# Altium footprint library SOP.PcbLib: 19 footprints (part 1 of 2)
Each footprint in its own frame and in the unit in brackets; x right, y up, seen from the top. Pads: shape width x height; smd on the part's side, far side on the other; paste and mask are expansions set on the pad; w line width, h text height; cw(c..) or ccw(c..) is an arc to the next point about the centre after c.
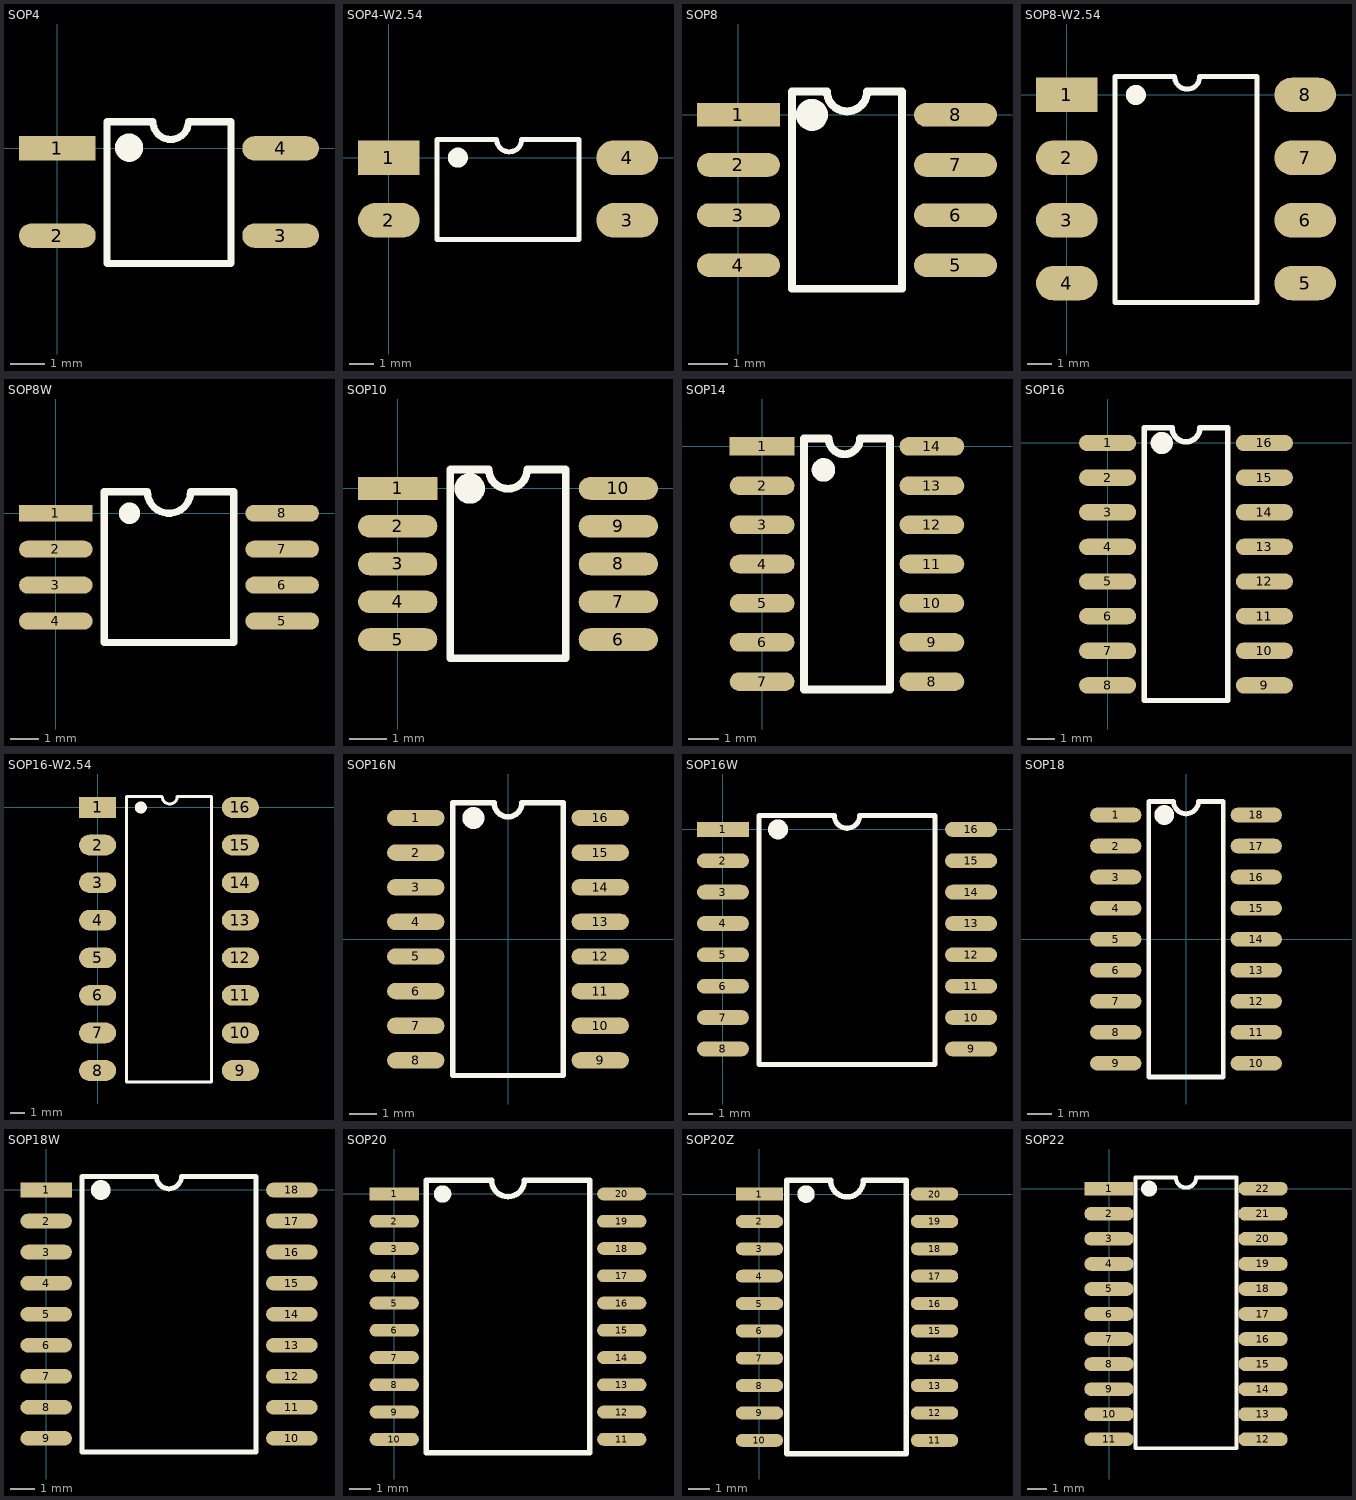
[diagram p0: the footprints below, top view; thin cyan lines are the x and y axes]

## SOP4 [mm]
pads (4):
  rect 2.2x0.7 smd: 1(0,0)
  oval 2.2x0.7 smd: 2(0,-2.5) 3(6.4,-2.5) 4(6.4,0)
Top Overlay:
  circle w0.5: c2.057,0.02 r0.155
  lines w0.2: 1.422,0.762 1.422,-3.302 4.978,-3.302 4.978,0.762
  lines w0.203: 1.422,0.762 2.74,0.762 ccw(c3.248,0.762) 3.248,0.254 ccw(c3.248,0.762) 3.756,0.762 4.978,0.762
3D body "SOP4.STEP": height 1.9, standoff 0, extent -0.101,-3.429 6.705,0.871

## SOP4-W2.54 [mm]
pads (4):
  rect 2.5x1.4 smd: 1(0,0)
  oval 2.5x1.4 smd: 2(0,-2.54) 3(9.652,-2.54) 4(9.652,0)
Top Overlay:
  circle w0.5: c2.794,0 r0.155
  lines w0.2: 1.956,0.742 1.956,-3.322 7.696,-3.322 7.696,0.742
  lines w0.203: 1.956,0.742 4.366,0.742 ccw(c4.874,0.742) 4.874,0.234 ccw(c4.874,0.742) 5.382,0.742 7.696,0.742
3D body "SOP4-W2.54.STEP": height 3.83, standoff -0.02, extent -0.047,-3.564 9.953,1.016

## SOP8 [mm]
pads (8):
  rect 2.1x0.6 smd: 1(0,0)
  oval 2.1x0.6 smd: 2(0,-1.27) 3(0,-2.54) 4(0,-3.81) 5(5.5,-3.81) 6(5.5,-2.54) 7(5.5,-1.27) 8(5.5,0)
Top Overlay:
  circle w0.5: c1.861,0 r0.155
  lines w0.2: 1.353,0.595 1.353,-4.405 4.147,-4.405 4.147,0.595
  lines w0.203: 1.353,0.595 2.242,0.595 ccw(c2.75,0.595) 2.75,0.087 ccw(c2.75,0.595) 3.258,0.595 4.147,0.595
3D body "SOP8.STEP": height 1.9, standoff 0, extent -0.209,-4.405 5.797,0.595

## SOP8-W2.54 [mm]
pads (8):
  rect 2.5x1.4 smd: 1(0,0)
  oval 2.5x1.4 smd: 2(0,-2.54) 3(0,-5.08) 4(0,-7.62) 5(9.652,-7.62) 6(9.652,-5.08) 7(9.652,-2.54) 8(9.652,0)
Top Overlay:
  circle w0.5: c2.794,0 r0.155
  lines w0.2: 1.956,0.742 1.956,-8.402 7.696,-8.402 7.696,0.742
  lines w0.203: 1.956,0.742 4.366,0.742 ccw(c4.874,0.742) 4.874,0.234 ccw(c4.874,0.742) 5.382,0.742 7.696,0.742
3D body "SOP8-W2.54.STEP": height 3.82, standoff -0.03, extent -0.174,-8.64 9.826,1.02

## SOP8W [mm]
pads (8):
  rect 2.6x0.6 smd: 1(0,0)
  oval 2.6x0.6 smd: 2(0,-1.27) 3(0,-2.54) 4(0,-3.81) 5(8,-3.81) 6(8,-2.54) 7(8,-1.27) 8(8,0)
Top Overlay:
  circle w0.5: c2.603,0 r0.127
  lines w0.254: 1.714,-4.572 1.714,0.762 3.238,0.762 ccw(c4,0.762) 4.762,0.762 6.286,0.762 6.286,-4.572 1.714,-4.572
3D body "SOP8W.STEP": height 1.9, standoff 0, extent 0.248,-4.572 8.134,0.708

## SOP10 [mm]
height 1.75
pads (10):
  rect 2.1x0.6 smd: 1(0,0)
  oval 2.1x0.6 smd: 2(0,-1) 3(0,-2) 4(0,-3) 5(0,-4) 6(5.842,-4) 7(5.842,-3) 8(5.842,-2) 9(5.842,-1) 10(5.842,0)
Top Overlay:
  circle w0.5: c1.905,0 r0.155
  lines w0.2: 1.397,0.5 1.397,-4.5 4.445,-4.5 4.445,0.5
  lines w0.203: 1.397,0.5 2.413,0.5 ccw(c2.921,0.5) 2.921,-0.008 ccw(c2.921,0.5) 3.429,0.5 4.445,0.5
3D body "SOP10.STEP": height 1.55, standoff -0.05, extent -0.209,-4.482 5.797,0.418

## SOP14 [mm]
pads (14):
  rect 2.1x0.6 smd: 1(0,0)
  oval 2.1x0.6 smd: 2(0,-1.27) 3(0,-2.54) 4(0,-3.81) 5(0,-5.08) 6(0,-6.35) 7(0,-7.62) 8(5.5,-7.62) 9(5.5,-6.35) 10(5.5,-5.08) 11(5.5,-3.81) 12(5.5,-2.54) 13(5.5,-1.27) 14(5.5,0)
Top Overlay:
  circle w0.508: c1.988,-0.762 r0.127
  lines w0.254: 1.353,-7.874 1.353,0.254 2.157,0.254 ccw(c2.665,0.254) 2.665,-0.254 ccw(c2.665,0.254) 3.173,0.254 4.147,0.254 4.147,-7.874 1.353,-7.874
3D body "SOP14.STEP": height 1.9, standoff 0, extent -0.254,-8.16 5.752,0.54

## SOP16 [mm]
height 1.75
pads (16):
  oval 2.1x0.6 smd: 1(0,0) 2(0,-1.27) 3(0,-2.54) 4(0,-3.81) 5(0,-5.08) 6(0,-6.35) 7(0,-7.62) 8(0,-8.89) 9(5.75,-8.89) 10(5.75,-7.62) 11(5.75,-6.35) 12(5.75,-5.08) 13(5.75,-3.81) 14(5.75,-2.54) 15(5.75,-1.27) 16(5.75,0)
Top Overlay:
  circle w0.5: c1.986,0 r0.155
  lines w0.2: 1.351,0.555 1.351,-9.445 4.399,-9.445 4.399,0.555
  lines w0.203: 1.351,0.555 2.367,0.555 ccw(c2.875,0.555) 2.875,0.047 ccw(c2.875,0.555) 3.383,0.555 4.399,0.555
3D body "SOP16.STEP": height 1.9, standoff 0, extent -0.037,-9.445 5.969,0.555

## SOP16-W2.54 [mm]
pads (16):
  rect 2.5x1.4 smd: 1(0,0)
  oval 2.5x1.4 smd: 2(0,-2.54) 3(0,-5.08) 4(0,-7.62) 5(0,-10.16) 6(0,-12.7) 7(0,-15.24) 8(0,-17.78) 9(9.652,-17.78) 10(9.652,-15.24) 11(9.652,-12.7) 12(9.652,-10.16) 13(9.652,-7.62) 14(9.652,-5.08) 15(9.652,-2.54) 16(9.652,0)
Top Overlay:
  circle w0.5: c2.921,0 r0.155
  lines w0.2: 1.956,-18.562 7.696,-18.562 7.696,0.742 ; 1.956,-18.542 1.956,0.742
  lines w0.203: 1.956,0.742 4.366,0.742 ccw(c4.874,0.742) 4.874,0.234 ccw(c4.874,0.742) 5.382,0.742 7.696,0.742
3D body "SOP16-W2.54.STEP": height 3.82, standoff -0.03, extent -0.174,-18.804 9.826,1.016

## SOP16N [mm]
height 1.75
pads (16):
  oval 2.1x0.6 smd: 1(-3.383,4.445) 2(-3.383,3.175) 3(-3.383,1.905) 4(-3.383,0.635) 5(-3.383,-0.635) 6(-3.383,-1.905) 7(-3.383,-3.175) 8(-3.383,-4.445) 9(3.383,-4.445) 10(3.383,-3.175) 11(3.383,-1.905) 12(3.383,-0.635) 13(3.383,0.635) 14(3.383,1.905) 15(3.383,3.175) 16(3.383,4.445)
Top Overlay:
  circle w0.5: c-1.27,4.445 r0.155
  lines w0.2: -2.032,5 -2.032,-5 2.032,-5 2.032,5
  lines w0.203: -2.032,5 -0.508,5 ccw(c0,5) 0,4.492 ccw(c0,5) 0.508,5 2.032,5
3D body "SOP16N.STEP": height 1.9, standoff 0, extent -3.503,-5.293 3.503,5.207

## SOP16W [mm]
height 1.75
pads (16):
  rect 2.1x0.6 smd: 1(0,0)
  oval 2.1x0.6 smd: 2(0,-1.27) 3(0,-2.54) 4(0,-3.81) 5(0,-5.08) 6(0,-6.35) 7(0,-7.62) 8(0,-8.89) 9(10.05,-8.89) 10(10.05,-7.62) 11(10.05,-6.35) 12(10.05,-5.08) 13(10.05,-3.81) 14(10.05,-2.54) 15(10.05,-1.27) 16(10.05,0)
Top Overlay:
  circle w0.5: c2.231,0 r0.155
  lines w0.2: 1.469,0.555 1.469,-9.525 8.581,-9.525 8.581,0.555
  lines w0.203: 1.469,0.555 4.517,0.555 ccw(c5.025,0.555) 5.025,0.047 ccw(c5.025,0.555) 5.533,0.555 8.581,0.555
3D body "SOP16W.STEP": height 2.7, standoff 0, extent -0.171,-9.595 10.135,0.705

## SOP18 [mm]
pads (18):
  oval 2.1x0.6 smd: 1(-2.875,5.08) 2(-2.875,3.81) 3(-2.875,2.54) 4(-2.875,1.27) 5(-2.875,0) 6(-2.875,-1.27) 7(-2.875,-2.54) 8(-2.875,-3.81) 9(-2.875,-5.08) 10(2.875,-5.08) 11(2.875,-3.81) 12(2.875,-2.54) 13(2.875,-1.27) 14(2.875,0) 15(2.875,1.27) 16(2.875,2.54) 17(2.875,3.81) 18(2.875,5.08)
Top Overlay:
  circle w0.5: c-0.889,5.08 r0.155
  lines w0.2: -1.524,5.635 -1.524,-5.635 1.524,-5.635 1.524,5.635
  lines w0.203: -1.524,5.635 -0.508,5.635 ccw(c0,5.635) 0,5.127 ccw(c0,5.635) 0.508,5.635 1.524,5.635
3D body "SOP18.STEP": height 1.9, standoff 0, extent -2.927,-5.81 3.079,5.69

## SOP18W [mm]
pads (18):
  rect 2.1x0.6 smd: 1(0,0)
  oval 2.1x0.6 smd: 2(0,-1.27) 3(0,-2.54) 4(0,-3.81) 5(0,-5.08) 6(0,-6.35) 7(0,-7.62) 8(0,-8.89) 9(0,-10.16) 10(10.05,-10.16) 11(10.05,-8.89) 12(10.05,-7.62) 13(10.05,-6.35) 14(10.05,-5.08) 15(10.05,-3.81) 16(10.05,-2.54) 17(10.05,-1.27) 18(10.05,0)
Top Overlay:
  circle w0.5: c2.231,0 r0.155
  lines w0.2: 1.469,0.555 1.469,-10.715 8.581,-10.715 8.581,0.555
  lines w0.203: 1.469,0.555 4.517,0.555 ccw(c5.025,0.555) 5.025,0.047 ccw(c5.025,0.555) 5.533,0.555 8.581,0.555
3D body "SOP18W.STEP": height 2.7, standoff 0, extent -0.225,-10.865 10.08,0.635

## SOP20 [mm]
pads (20):
  rect 2.3x0.6 smd: 1(0,0)
  oval 2.3x0.6 smd: 2(0,-1.27) 3(0,-2.54) 4(0,-3.81) 5(0,-5.08) 6(0,-6.35) 7(0,-7.62) 8(0,-8.89) 9(0,-10.16) 10(0,-11.43) 11(10.6,-11.43) 12(10.6,-10.16) 13(10.6,-8.89) 14(10.6,-7.62) 15(10.6,-6.35) 16(10.6,-5.08) 17(10.6,-3.81) 18(10.6,-2.54) 19(10.6,-1.27) 20(10.6,0)
Top Overlay:
  circle w0.5: c2.252,0 r0.155
  lines w0.254: 1.49,-12.065 9.11,-12.065 9.11,0.635 6.062,0.635 cw(c5.3,0.635) 5.3,-0.127 cw(c5.3,0.635) 4.538,0.635 1.49,0.635 1.49,-12.065
3D body "SOP20.STEP": height 2.7, standoff 0, extent 0.13,-12.065 10.436,0.635

## SOP20Z [mm] "窄体"
pads (20):
  rect 2.2x0.6 smd: 1(0,0)
  oval 2.2x0.6 smd: 2(0,-1.27) 3(0,-2.54) 4(0,-3.81) 5(0,-5.08) 6(0,-6.35) 7(0,-7.62) 8(0,-8.89) 9(0,-10.16) 10(0,-11.43) 11(8.128,-11.43) 12(8.128,-10.16) 13(8.128,-8.89) 14(8.128,-7.62) 15(8.128,-6.35) 16(8.128,-5.08) 17(8.128,-3.81) 18(8.128,-2.54) 19(8.128,-1.27) 20(8.128,0)
Top Overlay:
  circle w0.5: c2.159,0 r0.155
  lines w0.254: 1.264,-12.065 1.264,0.635 3.305,0.635 ccw(c4.067,0.635) 4.067,-0.127 ccw(c4.067,0.635) 4.829,0.635 6.814,0.635 6.814,-12.065 1.264,-12.065
3D body "SOP20Z.STEP": height 2.7, standoff 0, extent 0.137,-11.992 8.144,0.508

## SOP22 [mm]
pads (22):
  rect 2.5x0.7 smd: 1(0,0)
  oval 2.5x0.7 smd: 2(0,-1.27) 3(0,-2.54) 4(0,-3.81) 5(0,-5.08) 6(0,-6.35) 7(0,-7.62) 8(0,-8.89) 9(0,-10.16) 10(0,-11.43) 11(0,-12.7) 12(7.8,-12.7) 13(7.8,-11.43) 14(7.8,-10.16) 15(7.8,-8.89) 16(7.8,-7.62) 17(7.8,-6.35) 18(7.8,-5.08) 19(7.8,-3.81) 20(7.8,-2.54) 21(7.8,-1.27) 22(7.8,0)
Top Overlay:
  circle w0.5: c2.032,0 r0.155
  lines w0.2: 1.351,0.555 1.351,-13.152 6.449,-13.148 6.449,0.555
  lines w0.203: 1.351,0.555 3.392,0.555 ccw(c3.9,0.555) 3.9,0.047 ccw(c3.9,0.555) 4.408,0.555 6.449,0.555
3D body "SOP22.STEP": height 2.1, standoff -0.02, extent -0.167,-13.143 7.939,0.457